# Altium footprint library cap.PcbLib: 89 footprints (part 6 of 6)
Each footprint in its own frame and in the unit in brackets; x right, y up, seen from the top. Pads: shape width x height; smd on the part's side, far side on the other; paste and mask are expansions set on the pad; w line width, h text height; cw(c..) or ccw(c..) is an arc to the next point about the centre after c.
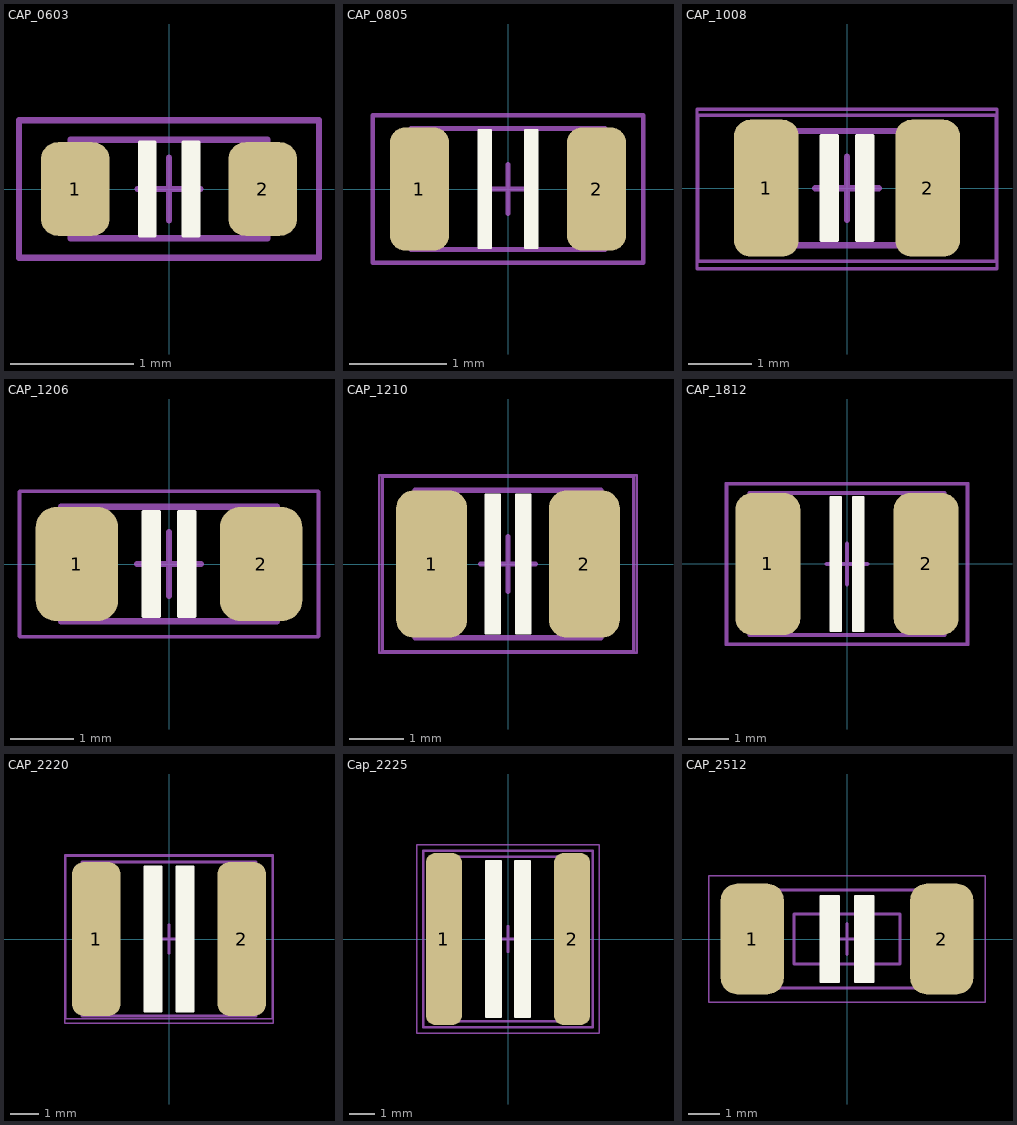
[diagram p5: the footprints below, top view; thin cyan lines are the x and y axes]

## CAP_0603 [mil]
pads (2):
  rrect50% 22x30 smd: 1(-30,0) 2(30,0)
Top Overlay:
  region: -4.5,15 -9.5,15 -9.5,-15 -4.5,-15
  region: 4.5,-15 9.5,-15 9.5,15 4.5,15
  lines w1: -9.5,-15 -9.5,15 -4.5,15 -4.5,-15 -9.5,-15 ; 4.5,-15 9.5,-15 9.5,15 4.5,15 4.5,-15
Mechanical 13:
  lines w2: -10,0 10,0 ; 0,-10 0,10 ; -31.5,-15.75 -31.5,15.75 31.5,15.75 31.5,-15.75 -31.5,-15.75
Top Component:
  lines w2: -48,-22 -48,22 48,22 48,-22 -48,-22
  text ".Designator" at -16,-11 h40
3D body "0603-CerCaps.step": height 33.99, standoff 1.51, extent -36.61,-16.23 36.62,16.25

## CAP_0805 [mil]
pads (2):
  rrect50% 24x50 smd: 1(-36,0) 2(36,0)
Top Overlay:
  region: 12,-24 7,-24 7,24 12,24
  region: -12,24 -7,24 -7,-24 -12,-24
  lines w1: -12,-24 -12,24 -7,24 -7,-24 -12,-24 ; 7,-24 12,-24 12,24 7,24 7,-24
Mechanical 13:
  lines w2: -10,0 10,0 ; 0,-10 0,10 ; -39.37,-24.61 39.37,-24.61 39.37,24.61 -39.37,24.61 -39.37,-24.61
Top Component:
  lines w2: -55,-30 55,-30 55,30 -55,30 -55,-30
  text ".Designator" at -24,-18 h60
3D body "0805-CerCaps.step": height 51.7, standoff 1.51, extent -42.91,-25.09 42.92,25.1

## CAP_1008 [mil]
pads (2):
  rrect50% 40x85 smd: 1(-50,0) 2(50,0)
Top Overlay:
  region: -6,-32.5 -16,-32.5 -16,32.5 -6,32.5
  region: 6,-32.5 16,-32.5 16,32.5 6,32.5
  lines w2: -16,-32.5 -6,-32.5 -6,32.5 -16,32.5 -16,-32.5 ; 6,-32.5 16,-32.5 16,32.5 6,32.5 6,-32.5
Mechanical 13:
  lines w3.94: -66.93,-35.43 66.93,-35.43 66.93,35.43 -66.93,35.43 -66.93,-35.43
Top Component:
  lines w2: -93,-50 -93,49 93,49 93,-50 -93,-50
  text ".Designator" at -32,-22 h80
Mechanical 19:
  lines w1.97: -92.52,-45.28 -92.52,45.28 92.52,45.28 92.52,-45.28 -92.52,-45.28
  lines w3.94: -19.68,0 19.69,0 ; 0,-19.68 0,19.69
3D body "1008-CerCaps.step": height 81.23, standoff 1.51, extent -53.93,-39.86 53.94,39.87

## CAP_1206 [mm]
pads (2):
  rrect50% 1.3x1.8 smd: 1(-1.45,0) 2(1.45,0)
Top Overlay:
  region: -0.152,-0.826 -0.406,-0.826 -0.406,0.826 -0.152,0.826
  region: 0.152,-0.826 0.406,-0.826 0.406,0.826 0.152,0.826
  lines w0.051: -0.406,-0.826 -0.406,0.826 -0.152,0.826 -0.152,-0.826 -0.406,-0.826 ; 0.152,-0.826 0.152,0.826 0.406,0.826 0.406,-0.826 0.152,-0.826
Mechanical 13:
  lines w0.1: -1.7,-0.9 -1.7,0.9 1.7,0.9 1.7,-0.9 -1.7,-0.9
Top Component:
  lines w0.051: -2.362,-1.143 2.362,-1.143 2.362,1.143 -2.362,1.143 -2.362,-1.143
  text ".Designator" at -0.813,-0.559 h2.03
Mechanical 19:
  lines w0.05: -2.35,-1.15 2.35,-1.15 2.35,1.15 -2.35,1.15 -2.35,-1.15
  lines w0.1: -0.5,0 0.5,0 ; 0,-0.5 0,0.5
3D body "1206-CerCaps.step": height 1.66, standoff 0.04, extent -1.75,-0.812 1.75,0.813

## CAP_1210 [mm]
pads (2):
  rrect50% 1.3x2.7 smd: 1(-1.4,0) 2(1.4,0)
Top Overlay:
  region: 0.152,-1.27 0.406,-1.27 0.406,1.27 0.152,1.27
  region: -0.152,-1.27 -0.406,-1.27 -0.406,1.27 -0.152,1.27
  lines w0.051: -0.406,-1.27 -0.152,-1.27 -0.152,1.27 -0.406,1.27 -0.406,-1.27 ; 0.152,-1.27 0.406,-1.27 0.406,1.27 0.152,1.27 0.152,-1.27
Mechanical 13:
  lines w0.1: -1.7,-1.35 -1.7,1.35 1.7,1.35 1.7,-1.35 -1.7,-1.35
Top Component:
  lines w0.051: -2.362,-1.626 -2.362,1.626 2.362,1.626 2.362,-1.626 -2.362,-1.626
  text ".Designator" at -0.813,-0.559 h2.03
Mechanical 19:
  lines w0.05: -2.3,-1.6 2.3,-1.6 2.3,1.6 -2.3,1.6 -2.3,-1.6
  lines w0.1: -0.5,0 0.5,0 ; 0,-0.5 0,0.5
3D body "User Library-CerCaps1210.step": height 2.56, standoff 0.04, extent -1.75,-1.262 1.75,1.263

## CAP_1812 [mm]
pads (2):
  rrect50% 1.6x3.5 smd: 1(-1.95,0) 2(1.95,0)
Top Overlay:
  region: -0.152,-1.651 -0.406,-1.651 -0.406,1.651 -0.152,1.651
  region: 0.152,-1.651 0.406,-1.651 0.406,1.651 0.152,1.651
  lines w0.051: -0.406,-1.651 -0.152,-1.651 -0.152,1.651 -0.406,1.651 -0.406,-1.651 ; 0.152,-1.651 0.406,-1.651 0.406,1.651 0.152,1.651 0.152,-1.651
Mechanical 13:
  lines w0.1: -2.4,-1.75 -2.4,1.75 2.4,1.75 2.4,-1.75 -2.4,-1.75
Top Component:
  lines w0.051: -2.946,-1.956 -2.946,1.956 2.946,1.956 2.946,-1.956 -2.946,-1.956
  text ".Designator" at -0.813,-0.559 h2.03
Mechanical 19:
  lines w0.05: -3,-2 -3,2 3,2 3,-2 -3,-2
  lines w0.1: -0.5,0 0.5,0 ; 0,-0.5 0,0.5
3D body "1812-CerCaps.step": height 3.26, standoff 0.04, extent -2.46,-1.612 2.46,1.613

## CAP_2220 [mm]
pads (2):
  rrect50% 1.7x5.4 smd: 1(-2.55,0) 2(2.55,0)
Top Overlay:
  region: -0.254,-2.54 -0.864,-2.54 -0.864,2.54 -0.254,2.54
  region: 0.254,-2.54 0.864,-2.54 0.864,2.54 0.254,2.54
  lines w0.051: -0.864,-2.54 -0.864,2.54 -0.254,2.54 -0.254,-2.54 -0.864,-2.54 ; 0.254,-2.54 0.254,2.54 0.864,2.54 0.864,-2.54 0.254,-2.54
Mechanical 13:
  lines w0.1: -3.05,-2.7 -3.05,2.7 3.05,2.7 3.05,-2.7 -3.05,-2.7
Top Component:
  lines w0.051: -3.607,-2.794 3.607,-2.794 3.607,2.896 -3.607,2.896 -3.607,-2.794
  text ".Designator" at -0.813,-0.559 h2.03
Mechanical 19:
  lines w0.05: -3.65,-2.95 -3.65,2.95 3.65,2.95 3.65,-2.95 -3.65,-2.95
  lines w0.1: -0.5,0 0.5,0 ; 0,-0.5 0,0.5
3D body "CAP 2020-3.0mm.STEP": height 3, standoff 0, extent -2.85,-2.5 2.85,2.5

## Cap_2225 [mm]
pads (2):
  rrect50% 1.4x6.7 smd: 1(-2.5,0) 2(2.5,0)
Top Overlay:
  region: -0.254,-3.048 -0.864,-3.048 -0.864,3.048 -0.254,3.048
  region: 0.254,-3.048 0.864,-3.048 0.864,3.048 0.254,3.048
  lines w0.051: -0.864,-3.048 -0.864,3.048 -0.254,3.048 -0.254,-3.048 -0.864,-3.048 ; 0.254,-3.048 0.254,3.048 0.864,3.048 0.864,-3.048 0.254,-3.048
Mechanical 13:
  lines w0.1: -2.819,-3.2 -2.819,3.2 2.819,3.2 2.819,-3.2 -2.819,-3.2
Top Component:
  lines w0.051: -3.556,-3.683 -3.556,3.683 3.556,3.683 3.556,-3.683 -3.556,-3.683
  text ".Designator" at -0.813,-0.559 h2.03
Mechanical 19:
  lines w0.1: -0.5,0 0.5,0 ; 0,-0.5 0,0.5 ; -3.3,-3.45 3.3,-3.45 3.3,3.45 -3.3,3.45 -3.3,-3.45
3D body "2225-CerCaps.step": height 1.45, standoff 0.05, extent -2.8,-3.2 2.8,3.2

## CAP_2512 [mil]
pads (2):
  rrect50% 80x140 smd: 1(-120.01,0) 2(120,0)
Top Overlay:
  region: -10,-55 -34,-55 -34,55 -10,55
  region: 10,-55 34,-55 34,55 10,55
  lines w2: -34,-55 -10,-55 -10,55 -34,55 -34,-55 ; 10,-55 34,-55 34,55 10,55 10,-55
Mechanical 13:
  lines w3.94: -137,-62 136.62,-62 136.62,62 -137,62 -137,-62
Top Component:
  lines w2: -175,-80 -175,80 175,80 175,-80 -175,-80
  text ".Designator" at -32,-22 h80
Mechanical 19:
  lines w3.94: -19.68,0 19.69,0 ; 0,-19.68 0,19.69 ; -66.93,-31.5 66.93,-31.5 66.93,31.5 -66.93,31.5 -66.93,-31.5
3D body "2512-CerCaps.step": height 128.48, standoff 1.51, extent -136.61,-63.48 136.62,63.49